# Altium footprint library SXLP450.PcbLib: 1 footprints
Each footprint in its own frame and in the unit in brackets; x right, y up, seen from the top. Pads: shape width x height; smd on the part's side, far side on the other; paste and mask are expansions set on the pad; w line width, h text height; cw(c..) or ccw(c..) is an arc to the next point about the centre after c.
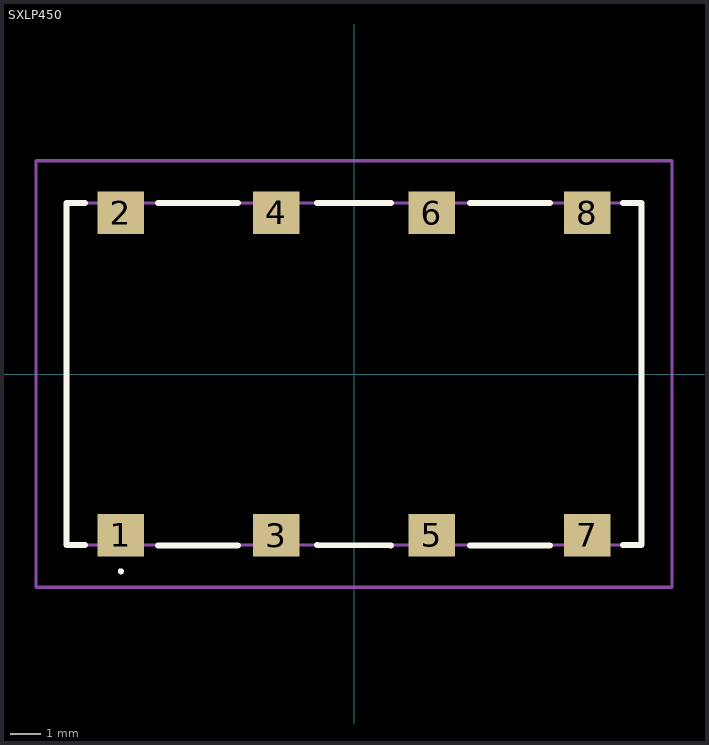
[diagram p0: the footprint, top view; thin cyan lines are the x and y axes]

## SXLP450 [mm]
pads (8):
  rect 1.52x1.4 smd: 1(-7.62,-5.27) 2(-7.62,5.27) 3(-2.54,-5.27) 4(-2.54,5.27) 5(2.54,-5.27) 6(2.54,5.27) 7(7.62,-5.27) 8(7.62,5.27)
Top Overlay:
  lines w0.1: -7.62,-6.5 cw(c-7.62,-6.45) -7.62,-6.4 ; -7.62,-6.5 -7.62,-6.5 ; -7.62,-6.5 ccw(c-7.62,-6.45) -7.62,-6.4 ; -7.62,-6.4 -7.62,-6.4
  lines w0.2: -8.8,-5.59 -9.4,-5.59 -9.4,5.59 -8.8,5.59 ; -6.4,-5.6 -3.8,-5.6 ; -6.4,5.59 -3.8,5.59 ; -1.2,-5.59 1.2,-5.6 ; -1.2,5.59 1.2,5.59 ; 3.8,-5.6 6.4,-5.6 ; 3.8,5.59 6.4,5.59 ; 8.8,-5.59 9.4,-5.59 9.4,5.59 8.8,5.59
Mechanical 15:
  lines w0.1: -9.4,-5.59 9.4,-5.59 9.4,5.59 -9.4,5.59 -9.4,-5.59
Mechanical 20:
  lines w0.1: -10.4,-6.97 10.4,-6.97 10.4,6.97 -10.4,6.97 -10.4,-6.97